# Altium footprint library SamacSys.PcbLib: 1008 footprints (part 54 of 63)
Each footprint in its own frame and in the unit in brackets; x right, y up, seen from the top. Pads: shape width x height; smd on the part's side, far side on the other; paste and mask are expansions set on the pad; w line width, h text height; cw(c..) or ccw(c..) is an arc to the next point about the centre after c.
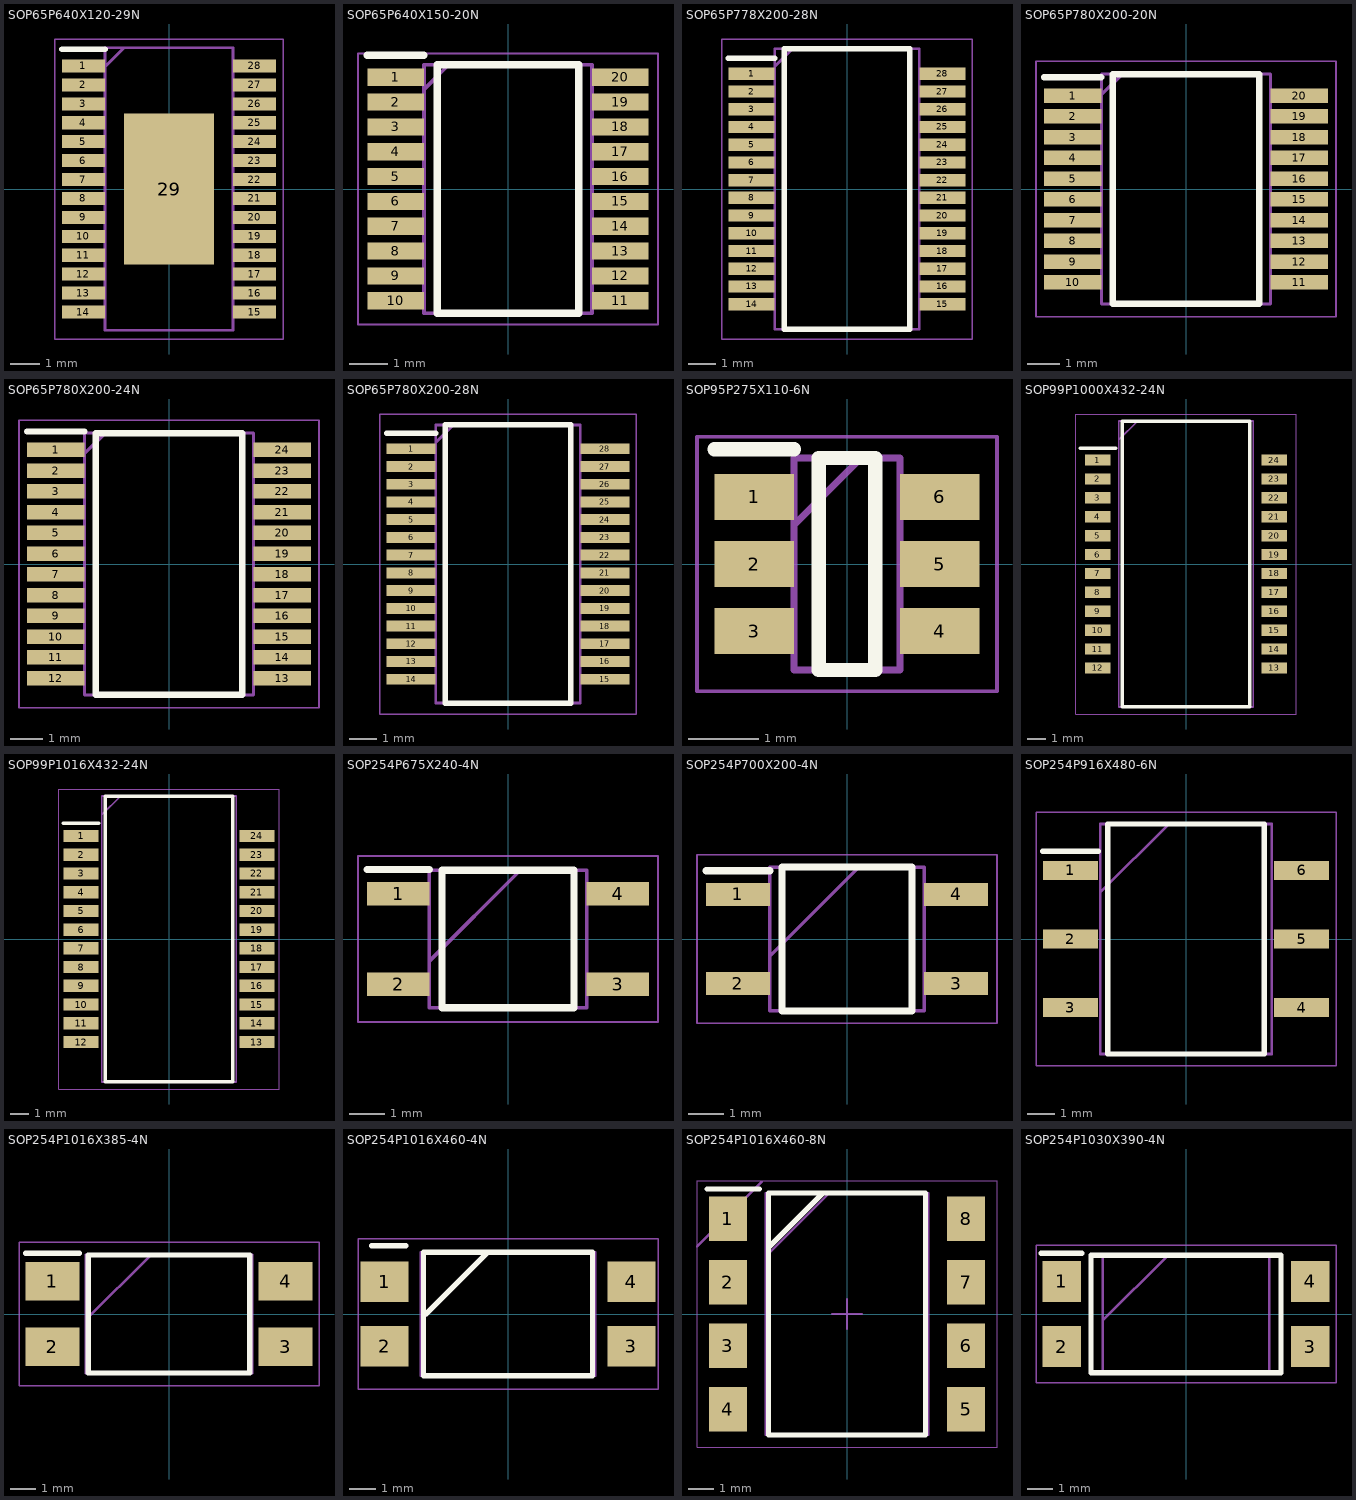
[diagram p53: the footprints below, top view; thin cyan lines are the x and y axes]

## SOP65P640X120-29N [mm]
pads (29):
  rect 1.475x0.45 smd: 1(-2.938,4.225) 2(-2.938,3.575) 3(-2.938,2.925) 4(-2.938,2.275) 5(-2.938,1.625) 6(-2.938,0.975) 7(-2.938,0.325) 8(-2.938,-0.325) 9(-2.938,-0.975) 10(-2.938,-1.625) 11(-2.938,-2.275) 12(-2.938,-2.925) 13(-2.938,-3.575) 14(-2.938,-4.225) 15(2.938,-4.225) 16(2.938,-3.575) 17(2.938,-2.925) 18(2.938,-2.275) 19(2.938,-1.625) 20(2.938,-0.975) 21(2.938,-0.325) 22(2.938,0.325) 23(2.938,0.975) 24(2.938,1.625) 25(2.938,2.275) 26(2.938,2.925) 27(2.938,3.575) 28(2.938,4.225)
  rect 3.1x5.18 smd: 29(0,0)
Top Overlay:
  lines w0.2: -3.675,4.8 -2.2,4.8
Assembly:
  lines w0.1: -2.2,4.2 -1.55,4.85 ; -2.2,-4.85 -2.2,4.85 2.2,4.85 2.2,-4.85 -2.2,-4.85
Countryard:
  lines w0.05: -3.925,-5.15 -3.925,5.15 3.925,5.15 3.925,-5.15 -3.925,-5.15
3D body "LM5175PWPT.stp": height 1.13, standoff 0, extent -3.2,-4.85 3.2,4.85

## SOP65P640X150-20N [mm]
pads (20):
  rect 1.475x0.45 smd: 1(-2.938,2.925) 2(-2.938,2.275) 3(-2.938,1.625) 4(-2.938,0.975) 5(-2.938,0.325) 6(-2.938,-0.325) 7(-2.938,-0.975) 8(-2.938,-1.625) 9(-2.938,-2.275) 10(-2.938,-2.925) 11(2.938,-2.925) 12(2.938,-2.275) 13(2.938,-1.625) 14(2.938,-0.975) 15(2.938,-0.325) 16(2.938,0.325) 17(2.938,0.975) 18(2.938,1.625) 19(2.938,2.275) 20(2.938,2.925)
Top Overlay:
  lines w0.2: -3.675,3.5 -2.2,3.5 ; -1.85,-3.25 -1.85,3.25 1.85,3.25 1.85,-3.25 -1.85,-3.25
Assembly:
  lines w0.1: -2.2,2.6 -1.55,3.25 ; -2.2,-3.25 -2.2,3.25 2.2,3.25 2.2,-3.25 -2.2,-3.25
Countryard:
  lines w0.05: -3.925,-3.55 -3.925,3.55 3.925,3.55 3.925,-3.55 -3.925,-3.55
3D body "PCF8574TS_3,118.stp": height 1.5, standoff 0, extent -3.2,-3.25 3.2,3.25

## SOP65P778X200-28N [mm]
pads (28):
  rect 1.7x0.45 smd: 1(-3.5,4.225) 2(-3.5,3.575) 3(-3.5,2.925) 4(-3.5,2.275) 5(-3.5,1.625) 6(-3.5,0.975) 7(-3.5,0.325) 8(-3.5,-0.325) 9(-3.5,-0.975) 10(-3.5,-1.625) 11(-3.5,-2.275) 12(-3.5,-2.925) 13(-3.5,-3.575) 14(-3.5,-4.225) 15(3.5,-4.225) 16(3.5,-3.575) 17(3.5,-2.925) 18(3.5,-2.275) 19(3.5,-1.625) 20(3.5,-0.975) 21(3.5,-0.325) 22(3.5,0.325) 23(3.5,0.975) 24(3.5,1.625) 25(3.5,2.275) 26(3.5,2.925) 27(3.5,3.575) 28(3.5,4.225)
Top Overlay:
  lines w0.2: -4.35,4.8 -2.65,4.8 ; -2.3,-5.138 -2.3,5.138 2.3,5.138 2.3,-5.138 -2.3,-5.138
Assembly:
  lines w0.1: -2.65,4.488 -2,5.138 ; -2.65,-5.138 -2.65,5.138 2.65,5.138 2.65,-5.138 -2.65,-5.138
Countryard:
  lines w0.05: -4.6,-5.5 -4.6,5.5 4.6,5.5 4.6,-5.5 -4.6,-5.5
3D body "FT232RL.stp": height 2, standoff 0, extent -3.888,-5.138 3.888,5.138

## SOP65P780X200-20N [mm]
pads (20):
  rect 1.8x0.45 smd: 1(-3.55,2.925) 2(-3.55,2.275) 3(-3.55,1.625) 4(-3.55,0.975) 5(-3.55,0.325) 6(-3.55,-0.325) 7(-3.55,-0.975) 8(-3.55,-1.625) 9(-3.55,-2.275) 10(-3.55,-2.925) 11(3.55,-2.925) 12(3.55,-2.275) 13(3.55,-1.625) 14(3.55,-0.975) 15(3.55,-0.325) 16(3.55,0.325) 17(3.55,0.975) 18(3.55,1.625) 19(3.55,2.275) 20(3.55,2.925)
Top Overlay:
  lines w0.2: -4.45,3.5 -2.65,3.5 ; -2.3,-3.6 -2.3,3.6 2.3,3.6 2.3,-3.6 -2.3,-3.6
Assembly:
  lines w0.1: -2.65,2.95 -2,3.6 ; -2.65,-3.6 -2.65,3.6 2.65,3.6 2.65,-3.6 -2.65,-3.6
Countryard:
  lines w0.05: -4.7,-4 -4.7,4 4.7,4 4.7,-4 -4.7,-4
3D body "MCP23008-E_SS.stp": height 2, standoff 0, extent -3.9,-3.6 3.9,3.6

## SOP65P780X200-24N [mm]
pads (24):
  rect 1.8x0.45 smd: 1(-3.55,3.575) 2(-3.55,2.925) 3(-3.55,2.275) 4(-3.55,1.625) 5(-3.55,0.975) 6(-3.55,0.325) 7(-3.55,-0.325) 8(-3.55,-0.975) 9(-3.55,-1.625) 10(-3.55,-2.275) 11(-3.55,-2.925) 12(-3.55,-3.575) 13(3.55,-3.575) 14(3.55,-2.925) 15(3.55,-2.275) 16(3.55,-1.625) 17(3.55,-0.975) 18(3.55,-0.325) 19(3.55,0.325) 20(3.55,0.975) 21(3.55,1.625) 22(3.55,2.275) 23(3.55,2.925) 24(3.55,3.575)
Top Overlay:
  lines w0.2: -4.45,4.15 -2.65,4.15 ; -2.3,-4.1 -2.3,4.1 2.3,4.1 2.3,-4.1 -2.3,-4.1
Assembly:
  lines w0.1: -2.65,3.45 -2,4.1 ; -2.65,-4.1 -2.65,4.1 2.65,4.1 2.65,-4.1 -2.65,-4.1
Countryard:
  lines w0.05: -4.7,-4.5 -4.7,4.5 4.7,4.5 4.7,-4.5 -4.7,-4.5
3D body "SN74CBTD3384CDBR.stp": height 1.86, standoff 0, extent -3.913,-4.1 3.913,4.1

## SOP65P780X200-28N [mm]
pads (28):
  rect 1.8x0.4 smd mask+0.05: 1(-3.55,4.225) 2(-3.55,3.575) 3(-3.55,2.925) 4(-3.55,2.275) 5(-3.55,1.625) 6(-3.55,0.975) 7(-3.55,0.325) 8(-3.55,-0.325) 9(-3.55,-0.975) 10(-3.55,-1.625) 11(-3.55,-2.275) 12(-3.55,-2.925) 13(-3.55,-3.575) 14(-3.55,-4.225) 15(3.55,-4.225) 16(3.55,-3.575) 17(3.55,-2.925) 18(3.55,-2.275) 19(3.55,-1.625) 20(3.55,-0.975) 21(3.55,-0.325) 22(3.55,0.325) 23(3.55,0.975) 24(3.55,1.625) 25(3.55,2.275) 26(3.55,2.925) 27(3.55,3.575) 28(3.55,4.225)
Top Overlay:
  lines w0.2: -4.45,4.8 -2.65,4.8 ; -2.3,-5.1 -2.3,5.1 2.3,5.1 2.3,-5.1 -2.3,-5.1
Assembly:
  lines w0.1: -2.65,4.45 -2,5.1 ; -2.65,-5.1 -2.65,5.1 2.65,5.1 2.65,-5.1 -2.65,-5.1
Countryard:
  lines w0.05: -4.7,-5.5 -4.7,5.5 4.7,5.5 4.7,-5.5 -4.7,-5.5
3D body "FT232RL-TUBE.stp": height 2, standoff 0, extent -3.9,-5.1 3.9,5.1

## SOP95P275X110-6N [mm]
pads (6):
  rect 1.125x0.65 smd: 1(-1.312,0.95) 2(-1.312,0) 3(-1.312,-0.95) 4(1.312,-0.95) 5(1.312,0) 6(1.312,0.95)
Top Overlay:
  lines w0.2: -1.875,1.625 -0.75,1.625 ; -0.4,-1.5 -0.4,1.5 0.4,1.5 0.4,-1.5 -0.4,-1.5
Assembly:
  lines w0.1: -0.75,0.55 0.2,1.5 ; -0.75,-1.5 -0.75,1.5 0.75,1.5 0.75,-1.5 -0.75,-1.5
Countryard:
  lines w0.05: -2.125,-1.8 -2.125,1.8 2.125,1.8 2.125,-1.8 -2.125,-1.8

## SOP99P1000X432-24N [mm]
pads (24):
  rect 1.35x0.6 smd: 1(-4.675,5.5) 2(-4.675,4.5) 3(-4.675,3.5) 4(-4.675,2.5) 5(-4.675,1.5) 6(-4.675,0.5) 7(-4.675,-0.5) 8(-4.675,-1.5) 9(-4.675,-2.5) 10(-4.675,-3.5) 11(-4.675,-4.5) 12(-4.675,-5.5) 13(4.675,-5.5) 14(4.675,-4.5) 15(4.675,-3.5) 16(4.675,-2.5) 17(4.675,-1.5) 18(4.675,-0.5) 19(4.675,0.5) 20(4.675,1.5) 21(4.675,2.5) 22(4.675,3.5) 23(4.675,4.5) 24(4.675,5.5)
Top Overlay:
  lines w0.2: -5.575,6.126 -3.725,6.126 ; -3.375,-7.556 -3.375,7.556 3.375,7.556 3.375,-7.556 -3.375,-7.556
Assembly:
  lines w0.1: -3.556,6.566 -2.565,7.556 ; -3.556,-7.556 3.556,-7.556 3.556,7.556 -3.556,7.556 -3.556,-7.556
Countryard:
  lines w0.05: -5.825,-7.934 5.825,-7.934 5.825,7.934 -5.825,7.934 -5.825,-7.934
3D body "HR682480.stp": height 4.32, standoff 0, extent -5.08,-7.556 5.08,7.556

## SOP99P1016X432-24N [mm]
pads (24):
  rect 1.85x0.65 smd: 1(-4.65,5.45) 2(-4.65,4.46) 3(-4.65,3.468) 4(-4.65,2.478) 5(-4.65,1.486) 6(-4.65,0.496) 7(-4.65,-0.496) 8(-4.65,-1.486) 9(-4.65,-2.478) 10(-4.65,-3.468) 11(-4.65,-4.46) 12(-4.65,-5.45) 13(4.65,-5.45) 14(4.65,-4.46) 15(4.65,-3.468) 16(4.65,-2.478) 17(4.65,-1.486) 18(4.65,-0.496) 19(4.65,0.496) 20(4.65,1.486) 21(4.65,2.478) 22(4.65,3.468) 23(4.65,4.46) 24(4.65,5.45)
Top Overlay:
  lines w0.2: -5.575,6.126 -3.725,6.126 ; -3.375,-7.556 3.375,-7.556 3.375,7.556 -3.375,7.556 -3.375,-7.556
Assembly:
  lines w0.1: -3.556,6.566 -2.565,7.556 ; -3.556,-7.556 3.556,-7.556 3.556,7.556 -3.556,7.556 -3.556,-7.556
Countryard:
  lines w0.05: -5.825,-7.934 5.825,-7.934 5.825,7.934 -5.825,7.934 -5.825,-7.934
3D body "HR682480.stp": height 4.32, standoff 0, extent -5.08,-7.556 5.08,7.556

## SOP254P675X240-4N [mm]
pads (4):
  rect 1.75x0.65 smd: 1(-3.075,1.27) 2(-3.075,-1.27) 3(3.075,-1.27) 4(3.075,1.27)
Top Overlay:
  lines w0.2: -3.95,1.945 -2.2,1.945 ; -1.85,-1.925 1.85,-1.925 1.85,1.925 -1.85,1.925 -1.85,-1.925
Assembly:
  lines w0.1: -2.2,-0.615 0.34,1.925 ; -2.2,-1.925 2.2,-1.925 2.2,1.925 -2.2,1.925 -2.2,-1.925
Countryard:
  lines w0.05: -4.2,-2.325 4.2,-2.325 4.2,2.325 -4.2,2.325 -4.2,-2.325
3D body "LTV-357T-B.stp": height 2.4, standoff 0, extent -3.375,-1.925 3.375,1.925

## SOP254P700X200-4N [mm]
pads (4):
  rect 1.825x0.65 smd: 1(-3.112,1.27) 2(-3.112,-1.27) 3(3.112,-1.27) 4(3.112,1.27)
Top Overlay:
  lines w0.2: -4.025,1.945 -2.2,1.945 ; -1.85,-2.05 -1.85,2.05 1.85,2.05 1.85,-2.05 -1.85,-2.05
Assembly:
  lines w0.1: -2.2,-0.49 0.34,2.05 ; -2.2,-2.05 -2.2,2.05 2.2,2.05 2.2,-2.05 -2.2,-2.05
Countryard:
  lines w0.05: -4.275,-2.4 -4.275,2.4 4.275,2.4 4.275,-2.4 -4.275,-2.4
3D body "EL357N-B-TA-G.stp": height 2, standoff 0, extent -3.5,-2.05 3.5,2.05

## SOP254P916X480-6N [mm]
pads (6):
  rect 2.05x0.7 smd: 1(-4.275,2.54) 2(-4.275,0) 3(-4.275,-2.54) 4(4.275,-2.54) 5(4.275,0) 6(4.275,2.54)
Top Overlay:
  lines w0.2: -5.3,3.24 -3.25,3.24 ; -2.9,-4.255 -2.9,4.255 2.9,4.255 2.9,-4.255 -2.9,-4.255
Assembly:
  lines w0.1: -3.175,1.715 -0.635,4.255 ; -3.175,-4.255 -3.175,4.255 3.175,4.255 3.175,-4.255 -3.175,-4.255
Countryard:
  lines w0.05: -5.55,-4.695 -5.55,4.695 5.55,4.695 5.55,-4.695 -5.55,-4.695
3D body "MOC3061SM.stp": height 5.08, standoff 0, extent -4.583,-4.255 4.583,4.255

## SOP254P1016X385-4N [mm]
pads (4):
  rect 2.1x1.5 smd: 1(-4.55,1.27) 2(-4.55,-1.27) 3(4.55,-1.27) 4(4.55,1.27)
Top Overlay:
  lines w0.2: -5.6,2.37 -3.5,2.37 ; -3.15,-2.3 -3.15,2.3 3.15,2.3 3.15,-2.3 -3.15,-2.3
Assembly:
  lines w0.1: -3.25,-0.24 -0.71,2.3 ; -3.25,-2.3 -3.25,2.3 3.25,2.3 3.25,-2.3 -3.25,-2.3
Countryard:
  lines w0.05: -5.85,-2.8 -5.85,2.8 5.85,2.8 5.85,-2.8 -5.85,-2.8
3D body "FOD817BSD.stp": height 3.85, standoff 0, extent -5.08,-2.3 5.08,2.3

## SOP254P1016X460-4N [mm]
pads (4):
  rect 1.78x1.52 smd: 1(-4.6,1.2) 2(-4.6,-1.2) 3(4.6,-1.2) 4(4.6,1.2)
Top Overlay:
  lines w0.2: -5.08,2.54 -3.81,2.54 ; -3.048,0 -0.762,2.286 ; -3.15,-2.3 -3.15,2.3 3.15,2.3 3.15,-2.3 -3.15,-2.3
Assembly:
  lines w0.1: -3.25,-0.24 -0.71,2.3 ; -3.25,-2.3 -3.25,2.3 3.25,2.3 3.25,-2.3 -3.25,-2.3
Countryard:
  lines w0.05: -5.588,-2.8 -5.588,2.8 5.588,2.8 5.588,-2.8 -5.588,-2.8
3D body "LTV-817S.stp": height 3.85, standoff 0, extent -5.08,-2.3 5.08,2.3

## SOP254P1016X460-8N [mm]
pads (8):
  rect 1.52x1.78 smd: 1(-4.76,3.81) 2(-4.76,1.27) 3(-4.76,-1.27) 4(-4.76,-3.81) 5(4.76,-3.81) 6(4.76,-1.27) 7(4.76,1.27) 8(4.76,3.81)
Top Overlay:
  lines w0.2: -5.6,5 -3.5,5 ; -3.1,2.7 -1,4.8 ; -3.15,-4.84 3.15,-4.84 3.15,4.84 -3.15,4.84 -3.15,-4.84
Top Assembly:
  lines w0.1: -3.25,2.3 -0.71,4.84 ; -3.25,-4.84 -3.25,4.84 3.25,4.84 3.25,-4.84 -3.25,-4.84
Countryard:
  lines w0.05: -6,-5.34 6,-5.34 6,5.34 -6,5.34 -6,-5.34
  lines w0.1: -6,2.7 -3.4,5.3 ; -0.6,0 0.6,0 ; 0,-0.6 0,0.6
3D body "SMD DIP 8 (300) Avago.STEP": height 4.2, standoff 0, extent -4.825,-4.825 4.825,4.825

## SOP254P1030X390-4N [mm]
pads (4):
  rect 1.5x1.6 smd: 1(-4.85,1.27) 2(-4.85,-1.27) 3(4.85,-1.27) 4(4.85,1.27)
Top Overlay:
  lines w0.2: -5.65,2.37 -4.05,2.37 ; -3.7,-2.29 3.7,-2.29 3.7,2.29 -3.7,2.29 -3.7,-2.29
Assembly:
  lines w0.1: -3.25,-0.25 -0.71,2.29 ; -3.25,-2.29 3.25,-2.29 3.25,2.29 -3.25,2.29 -3.25,-2.29
Countryard:
  lines w0.05: -5.85,-2.69 5.85,-2.69 5.85,2.69 -5.85,2.69 -5.85,-2.69
3D body "EL817_S1__D__TA_-VG.stp": height 3.9, standoff 0, extent -5.15,-2.29 5.15,2.29